# Altium integrated library VIETTIEN_2.IntLib: 110 symbols (part 3 of 5)

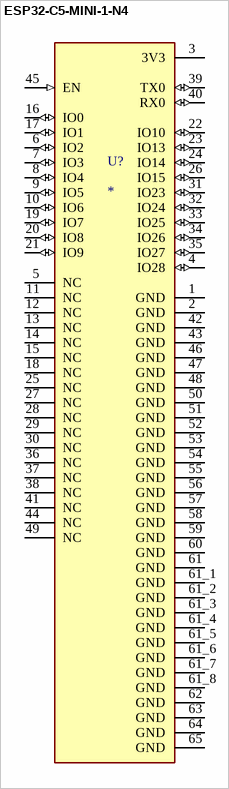
[diagram p46: symbol ESP32-C5-MINI-1-N4]

## ESP32-C5-MINI-1-N4
designator U?
Espressif WiFi module series ESP; MF: Espressif Systems; MP: ESP32-C5-MINI-1-N4; SnapEDA_Link: https://www.snapeda.com/parts/ESP32-C5-MINI-1-N4/Espressif+Systems/view-part/?ref=snap; Package: None; Value: *; Check_prices: https://www.snapeda.com/parts/ESP32-C5-MINI-1-N4/Espressif+Systems/view-part/?ref=eda
footprint XCVR_ESP32-C5-MINI-1-N4
pins: 1 GND (power), 2 GND (power), 3 3V3 (power), 4 IO28 (io), 5 NC, 6 IO2 (io), 7 IO3 (io), 8 IO4 (io), 9 IO5 (io), 10 IO6 (io), 11 NC, 12 NC, 13 NC, 14 NC, 15 NC, 16 IO0 (io), 17 IO1 (io), 18 NC, 19 IO7 (io), 20 IO8 (io), 21 IO9 (io), 22 IO10 (io), 23 IO13 (io), 24 IO14 (io), 25 NC, 26 IO15 (io), 27 NC, 28 NC, 29 NC, 30 NC, 31 IO23 (io), 32 IO24 (io), 33 IO25 (io), 34 IO26 (io), 35 IO27 (io), 36 NC, 37 NC, 38 NC, 39 TX0 (io), 40 RX0 (io), 41 NC, 42 GND (power), 43 GND (power), 44 NC, 45 EN (in), 46 GND (power), 47 GND (power), 48 GND (power), 49 NC, 50 GND (power), 51 GND (power), 52 GND (power), 53 GND (power), 54 GND (power), 55 GND (power), 56 GND (power), 57 GND (power), 58 GND (power), 59 GND (power), 60 GND (power), 61 GND (power), 61_1 GND (power), 61_2 GND (power), 61_3 GND (power), 61_4 GND (power), 61_5 GND (power), 61_6 GND (power), 61_7 GND (power), 61_8 GND (power), 62 GND (power), 63 GND (power), 64 GND (power), 65 GND (power)


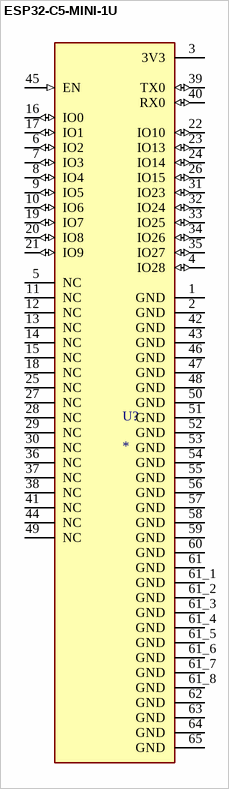
[diagram p47: symbol ESP32-C5-MINI-1U]

## ESP32-C5-MINI-1U
designator U?
Compact Wi-Fi 6 and Bluetooth 5.0 LE wireless module based on the ESP32-C5 SoC, featuring a 32-bit RISC-V single-core processor up to 240 MHz, 4 MB SPI flash, 2.4 GHz and 5 GHz dual-band Wi-Fi, IEEE 802.15.4 (Thread/Zigbee), and an external antenna connector (U.FL/IPEX). Integrated GPIO, SPI, UART, I2C, ADC, PWM and other peripherals. Designed for IoT, wireless communication, smart devices and embedded applications.
footprint ESP32-C5-MINI-1U
pins: 1 GND (power), 2 GND (power), 3 3V3 (power), 4 IO28 (io), 5 NC, 6 IO2 (io), 7 IO3 (io), 8 IO4 (io), 9 IO5 (io), 10 IO6 (io), 11 NC, 12 NC, 13 NC, 14 NC, 15 NC, 16 IO0 (io), 17 IO1 (io), 18 NC, 19 IO7 (io), 20 IO8 (io), 21 IO9 (io), 22 IO10 (io), 23 IO13 (io), 24 IO14 (io), 25 NC, 26 IO15 (io), 27 NC, 28 NC, 29 NC, 30 NC, 31 IO23 (io), 32 IO24 (io), 33 IO25 (io), 34 IO26 (io), 35 IO27 (io), 36 NC, 37 NC, 38 NC, 39 TX0 (io), 40 RX0 (io), 41 NC, 42 GND (power), 43 GND (power), 44 NC, 45 EN (in), 46 GND (power), 47 GND (power), 48 GND (power), 49 NC, 50 GND (power), 51 GND (power), 52 GND (power), 53 GND (power), 54 GND (power), 55 GND (power), 56 GND (power), 57 GND (power), 58 GND (power), 59 GND (power), 60 GND (power), 61 GND (power), 61_1 GND (power), 61_2 GND (power), 61_3 GND (power), 61_4 GND (power), 61_5 GND (power), 61_6 GND (power), 61_7 GND (power), 61_8 GND (power), 62 GND (power), 63 GND (power), 64 GND (power), 65 GND (power)


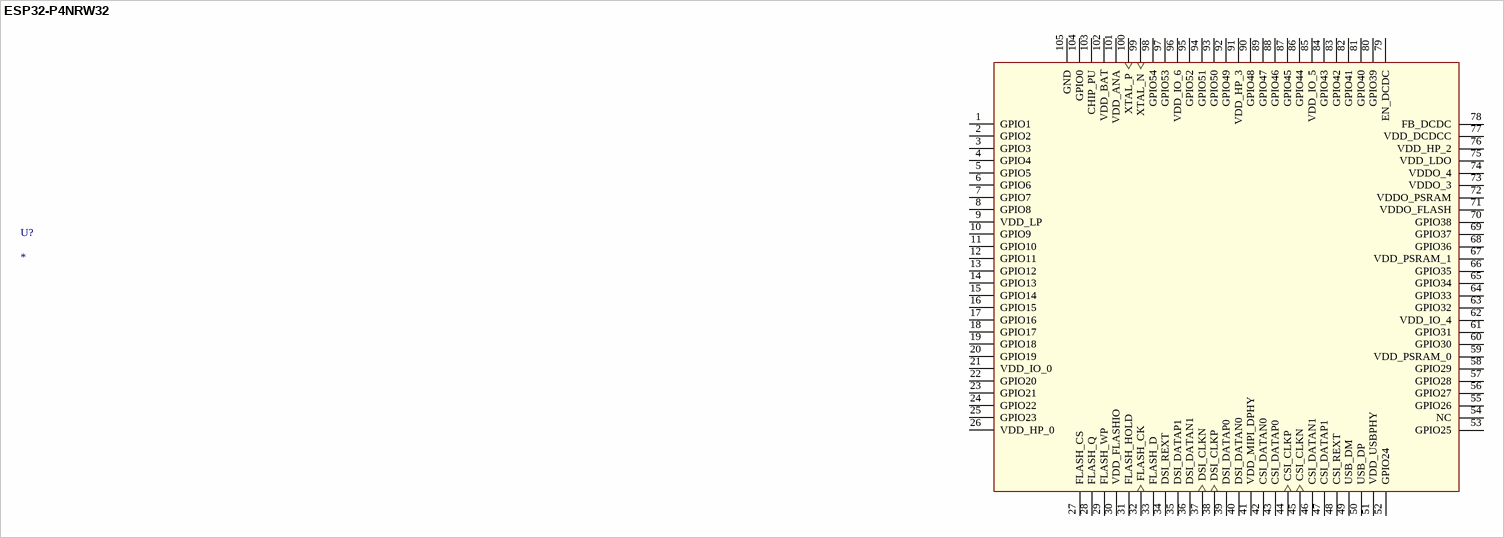
[diagram p48: symbol ESP32-P4NRW32]

## ESP32-P4NRW32
designator U?
High-performance MCU with one RISC-V 32-bit dual-core microprocessor; MF: Espressif Systems; MP: ESP32-P4NRW32; SnapEDA_Link: https://www.snapeda.com/parts/ESP32-P4NRW32/Espressif+Systems/view-part/?ref=snap; Package: None; Value: *; Check_prices: https://www.snapeda.com/parts/ESP32-P4NRW32/Espressif+Systems/view-part/?ref=eda
footprint IC_ESP32-P4NRW32
pins: 1 GPIO1, 2 GPIO2, 3 GPIO3, 4 GPIO4, 5 GPIO5, 6 GPIO6, 7 GPIO7, 8 GPIO8, 9 VDD_LP, 10 GPIO9, 11 GPIO10, 12 GPIO11, 13 GPIO12, 14 GPIO13, 15 GPIO14, 16 GPIO15, 17 GPIO16, 18 GPIO17, 19 GPIO18, 20 GPIO19, 21 VDD_IO_0, 22 GPIO20, 23 GPIO21, 24 GPIO22, 25 GPIO23, 26 VDD_HP_0, 27 FLASH_CS, 28 FLASH_Q, 29 FLASH_WP, 30 VDD_FLASHIO, 31 FLASH_HOLD, 32 FLASH_CK, 33 FLASH_D, 34 DSI_REXT, 35 DSI_DATAP1, 36 DSI_DATAN1, 37 DSI_CLKN, 38 DSI_CLKP, 39 DSI_DATAP0, 40 DSI_DATAN0, 41 VDD_MIPI_DPHY, 42 CSI_DATAN0, 43 CSI_DATAP0, 44 CSI_CLKP, 45 CSI_CLKN, 46 CSI_DATAN1, 47 CSI_DATAP1, 48 CSI_REXT, 49 USB_DM, 50 USB_DP, 51 VDD_USBPHY, 52 GPIO24, 53 GPIO25, 54 NC, 55 GPIO26, 56 GPIO27, 57 GPIO28, 58 GPIO29, 59 VDD_PSRAM_0, 60 GPIO30, 61 GPIO31, 62 VDD_IO_4, 63 GPIO32, 64 GPIO33, 65 GPIO34, 66 GPIO35, 67 VDD_PSRAM_1, 68 GPIO36, 69 GPIO37, 70 GPIO38, 71 VDDO_FLASH, 72 VDDO_PSRAM, 73 VDDO_3, 74 VDDO_4, 75 VDD_LDO, 76 VDD_HP_2, 77 VDD_DCDCC, 78 FB_DCDC, 79 EN_DCDC, 80 GPIO39, 81 GPIO40, 82 GPIO41, 83 GPIO42, 84 GPIO43, 85 VDD_IO_5, 86 GPIO44, 87 GPIO45, 88 GPIO46, 89 GPIO47, 90 GPIO48, 91 VDD_HP_3, 92 GPIO49, 93 GPIO50, 94 GPIO51, 95 GPIO52, 96 VDD_IO_6, 97 GPIO53, 98 GPIO54, 99 XTAL_N, 100 XTAL_P, 101 VDD_ANA, 102 VDD_BAT, 103 CHIP_PU, 104 GPIO0, 105 GND


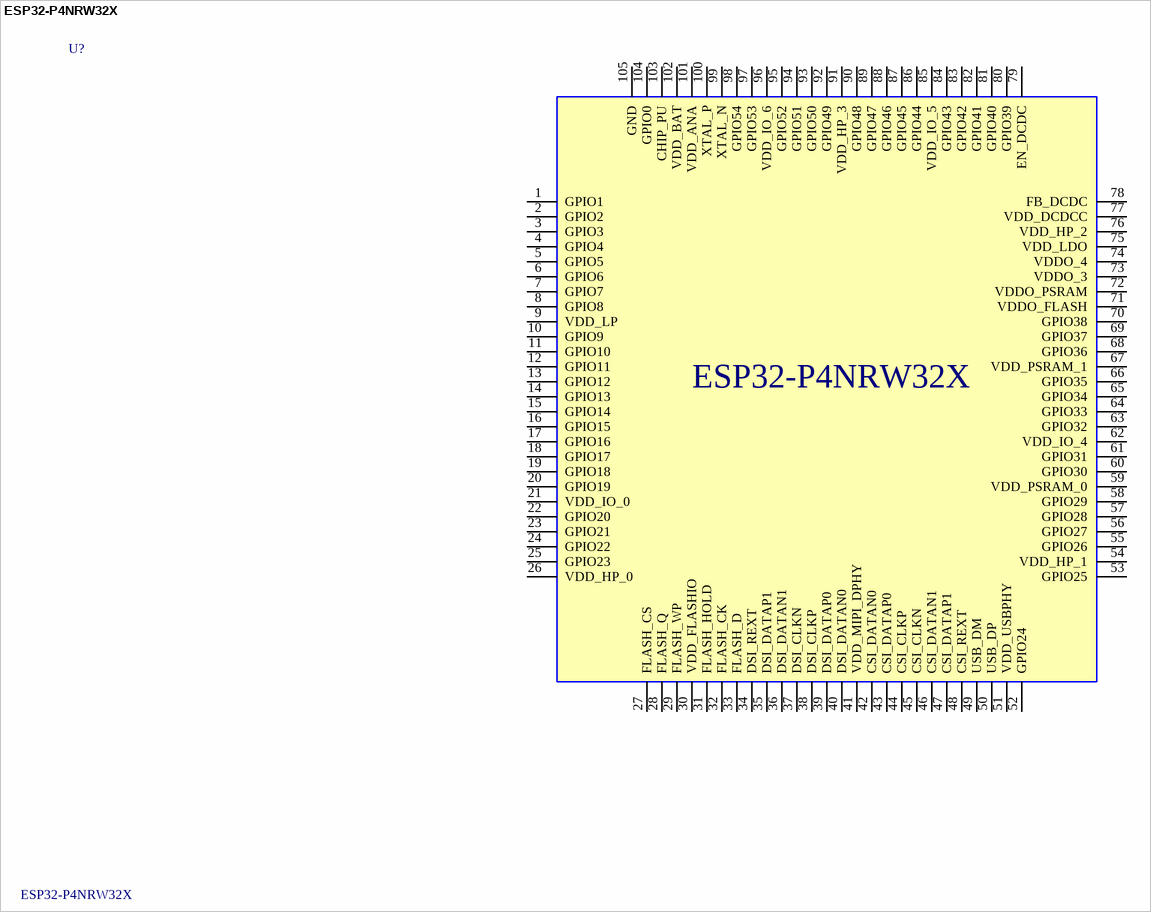
[diagram p49: symbol ESP32-P4NRW32X]

## ESP32-P4NRW32X
designator U?
Manufacturer: Espressif Systems; Value: ESP32-P4NRW32X; MPN: ESP32-P4NRW32X; Mouser Part #: 356-ESP32-P4NRW32X; DigiKey Part #: 1965-ESP32-P4NRW32XTR-ND; Manufacturer Part Number: ESP32-P4NRW32X
footprint ESP32-P4
pins: 1 GPIO1, 2 GPIO2, 3 GPIO3, 4 GPIO4, 5 GPIO5, 6 GPIO6, 7 GPIO7, 8 GPIO8, 9 VDD_LP, 10 GPIO9, 11 GPIO10, 12 GPIO11, 13 GPIO12, 14 GPIO13, 15 GPIO14, 16 GPIO15, 17 GPIO16, 18 GPIO17, 19 GPIO18, 20 GPIO19, 21 VDD_IO_0, 22 GPIO20, 23 GPIO21, 24 GPIO22, 25 GPIO23, 26 VDD_HP_0, 27 FLASH_CS, 28 FLASH_Q, 29 FLASH_WP, 30 VDD_FLASHIO, 31 FLASH_HOLD, 32 FLASH_CK, 33 FLASH_D, 34 DSI_REXT, 35 DSI_DATAP1, 36 DSI_DATAN1, 37 DSI_CLKN, 38 DSI_CLKP, 39 DSI_DATAP0, 40 DSI_DATAN0, 41 VDD_MIPI_DPHY, 42 CSI_DATAN0, 43 CSI_DATAP0, 44 CSI_CLKP, 45 CSI_CLKN, 46 CSI_DATAN1, 47 CSI_DATAP1, 48 CSI_REXT, 49 USB_DM, 50 USB_DP, 51 VDD_USBPHY, 52 GPIO24, 53 GPIO25, 54 VDD_HP_1, 55 GPIO26, 56 GPIO27, 57 GPIO28, 58 GPIO29, 59 VDD_PSRAM_0, 60 GPIO30, 61 GPIO31, 62 VDD_IO_4, 63 GPIO32, 64 GPIO33, 65 GPIO34, 66 GPIO35, 67 VDD_PSRAM_1, 68 GPIO36, 69 GPIO37, 70 GPIO38, 71 VDDO_FLASH, 72 VDDO_PSRAM, 73 VDDO_3, 74 VDDO_4, 75 VDD_LDO, 76 VDD_HP_2, 77 VDD_DCDCC, 78 FB_DCDC, 79 EN_DCDC, 80 GPIO39, 81 GPIO40, 82 GPIO41, 83 GPIO42, 84 GPIO43, 85 VDD_IO_5, 86 GPIO44, 87 GPIO45, 88 GPIO46, 89 GPIO47, 90 GPIO48, 91 VDD_HP_3, 92 GPIO49, 93 GPIO50, 94 GPIO51, 95 GPIO52, 96 VDD_IO_6, 97 GPIO53, 98 GPIO54, 99 XTAL_N, 100 XTAL_P, 101 VDD_ANA, 102 VDD_BAT, 103 CHIP_PU, 104 GPIO0, 105 GND


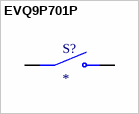
[diagram p50: symbol EVQ9P701P]

## EVQ9P701P
designator S?
MF: {'manufacturer': u'Panasonic Electronic Components'}; MP: EVQ9P701P; Package: None; Price: None; Value: *; Availability: Unavailable
footprint SW_EVQ9P701P
pins: 1_A NO, 1_B NO, 2_A NC, 2_B NC


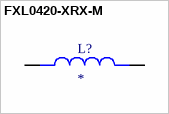
[diagram p51: symbol FXL0420-XRX-M]

## FXL0420-XRX-M
designator L?
footprint FXL0420-XRX-M
pins: 1, 2


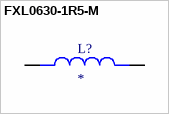
[diagram p52: symbol FXL0630-1R5-M]

## FXL0630-1R5-M
designator L?
MF: Analog Devices; MP: FXL0630-1R5-M; SnapEDA_Link: https://www.snapeda.com/parts/FXL0630-1R5-M/Analog+Devices/view-part/?ref=snap; Package: None; Value: *; Check_prices: https://www.snapeda.com/parts/FXL0630-1R5-M/Analog+Devices/view-part/?ref=eda
footprint INDM7066X300N
pins: 1, 2


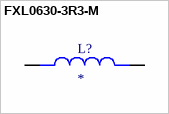
[diagram p53: symbol FXL0630-3R3-M]

## FXL0630-3R3-M
designator L?
Wire Wound Molded SMD Type Power Inductor; MF: Cjiang TW; MP: FXL0630-3R3-M; SnapEDA_Link: https://www.snapeda.com/parts/FXL0630-3R3-M/Cjiang+TW/view-part/?ref=snap; Package: Package; Value: *; Check_prices: https://www.snapeda.com/parts/FXL0630-3R3-M/Cjiang+TW/view-part/?ref=eda
footprint INDM7066X300N
pins: 1, 2


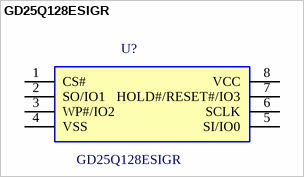
[diagram p54: symbol GD25Q128ESIGR]

## GD25Q128ESIGR
designator U?
Manufacturer: GigaDevice Semicon Beijing; Value: GD25Q128ESIGR; MPN: GD25Q128ESIGR; LCSC Part #: C2928891; Manufacturer Part Number: GD25Q128ESIGR
footprint SOIC-8_3.9x4.9mm_P1.27mm
pins: 1 CS#, 2 SO/IO1, 3 WP#/IO2, 4 VSS (power), 5 SI/IO0, 6 SCLK, 7 HOLD#/RESET#/IO3, 8 VCC (power)


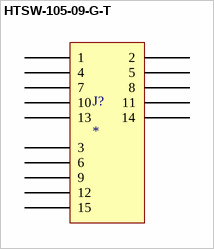
[diagram p55: symbol HTSW-105-09-G-T]

## HTSW-105-09-G-T
designator J?
15-Pin (3x5) Triple-Row Vertical Male Pin Header, 2.54mm Pitch, THT, Gold-Plated Contacts
footprint HTSW-105-09-G-T
pins: 1, 2, 3, 4, 5, 6, 7, 8, 9, 10, 11, 12, 13, 14, 15


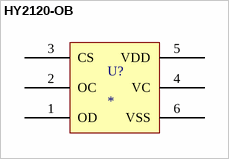
[diagram p56: symbol HY2120-OB]

## HY2120-OB
designator U?
2-cell Li-ion/Li-polymer battery protection IC with overcharge, over-discharge, overcurrent, and short-circuit protection.
footprint SOT23-6
pins: 1 OD, 2 OC, 3 CS, 4 VC, 5 VDD, 6 VSS


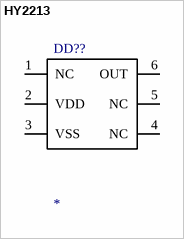
[diagram p57: symbol HY2213]

## HY2213
designator DD??
1 Cell Li-ion/Polymer Battery Charge Balance IC
footprint SOT23-6
pins: 1 NC (hiz), 2 VDD (power), 3 VSS (power), 4 NC (hiz), 5 NC (hiz), 6 OUT


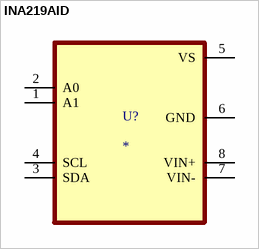
[diagram p58: symbol INA219AID]

## INA219AID
designator U?
26-V 12-bit I2C output digital power monitor; MF: Texas Instruments; MP: INA219AID; SnapEDA_Link: https://www.snapeda.com/parts/INA219AID/Texas+Instruments/view-part/?ref=snap; Package: SOIC-8 Texas Instruments; Value: *; Check_prices: https://www.snapeda.com/parts/INA219AID/Texas+Instruments/view-part/?ref=eda
footprint SOIC127P599X175-8N
pins: 1 A1, 2 A0, 3 SDA, 4 SCL, 5 VS (power), 6 GND (power), 7 VIN-, 8 VIN+


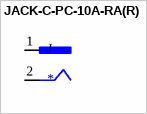
[diagram p59: symbol JACK-C-PC-10A-RA(R)]

## JACK-C-PC-10A-RA(R)
designator J
Power Barrel Connector Jack 2.10mm ID _0.083_, 5.50mm OD _0.217_ Through Hole, Right Angle; MF: GlobTek, Inc.; MP: JACK-C-PC-10A-RA_R_; Value: *; Digi-Key_Purchase_URL: https://www.digikey.com/product-detail/en/globtek-inc/JACK-C-PC-10A-RA_R_/1939-1086-ND/8597889?utm_source=snapeda&utm_medium=aggregator&utm_campaign=symbol; Digi-Key_Part_Number: 1939-1086-ND; Package: None; SnapEDA_Link: https://www.snapeda.com/parts/JACK-C-PC-10A-RA%28R%29/GlobTek%2C%20Inc./view-part/3076017/?ref=snap
footprint GLOBTECK_JACK-C-PC-10A-RA(R)
pins: 1, 2


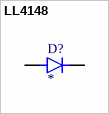
[diagram p60: symbol LL4148]

## LL4148
designator D?
Small Signal Diode, SOD-80, 100V, 0.15A, 175Â°C; MF: Diotec Semiconductor; MP: LL4148; SnapEDA_Link: https://www.snapeda.com/parts/LL4148/Diotec/view-part/?ref=snap; Package: SOD-80 Diotec; Value: *; Check_prices: https://www.snapeda.com/parts/LL4148/Diotec/view-part/?ref=eda
footprint DIO_LL4148
pins: A, C


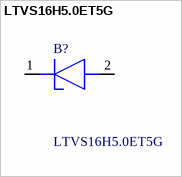
[diagram p61: symbol LTVS16H5.0ET5G]

## LTVS16H5.0ET5G
designator B?
DFN1610 ESD Protection Devices ROHS; Manufacturer_Name: LRC; Geometry.Height: 0.55mm; Manufacturer_Part_Number: LTVS16H5.0ET5G; Mouser Part Number: *; Mouser Price/Stock: *; Arrow Part Number: *; Arrow Price/Stock: *; Datasheet Link: https://www.alldatasheet.net/datasheet-pdf/pdf/1107931/LRC/LTVS16H5.0ET5G.html
footprint LTVS16H50ET5G
pins: 1 K, 2 A


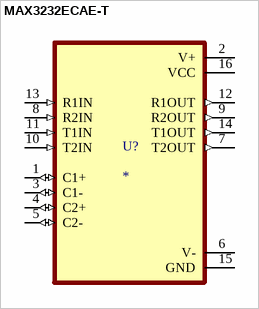
[diagram p62: symbol MAX3232ECAE-T]

## MAX3232ECAE-T
designator U?
Â±15kV ESD-Protected, Down to 10nA, 3.0V to 5.5V, Up to 1Mbps, True RS-232 Transceivers; MF: Analog Devices; MP: MAX3232ECAE+T; SnapEDA_Link: https://www.snapeda.com/parts/MAX3232ECAE+T/Analog+Devices/view-part/?ref=snap; Package: SSOP-16 Maxim; Value: *; Check_prices: https://www.snapeda.com/parts/MAX3232ECAE+T/Analog+Devices/view-part/?ref=eda
footprint SOP65P777X199-16N
pins: 1 C1+ (io), 2 V+ (power), 3 C1- (io), 4 C2+ (io), 5 C2- (io), 6 V- (power), 7 T2OUT (out), 8 R2IN (in), 9 R2OUT (out), 10 T2IN (in), 11 T1IN (in), 12 R1OUT (out), 13 R1IN (in), 14 T1OUT (out), 15 GND (power), 16 VCC (power)


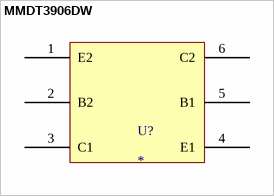
[diagram p63: symbol MMDT3906DW]

## MMDT3906DW
designator U?
Bipolar (BJT) Transistor PNP 40 V 0.2 A 250MHz 200 mW Surface Mount SOT-363
footprint SOT65P230X120-6N
pins: 1 E2, 2 B2, 3 C1, 4 E1, 5 B1, 6 C2


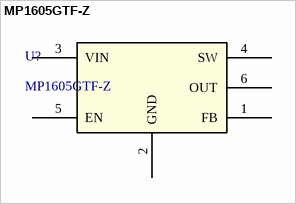
[diagram p64: symbol MP1605GTF-Z]

## MP1605GTF-Z
designator U?
2A 5.5V 2.2MHz Synchronous Step-Down Converter with Low11&micro;A Quiescent Current in SOT563 Package; Manufacturer_Name: Monolithic Power Systems; Copyright: Copyright (C) 2025 Ultra Librarian. All rights reserved.; Manufacturer_Part_Number: MP1605GTF-Z; RefDes: RefDes; Type: Type
footprint SOT563_MP1605_MNP
pins: 1 FB, 2 GND (power), 3 VIN (power), 4 SW, 5 EN, 6 OUT (power)


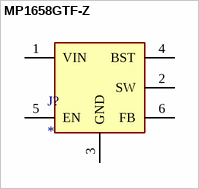
[diagram p65: symbol MP1658GTF-Z]

## MP1658GTF-Z
designator J?
MF: MPS Industries, Inc.; MP: MP1658GTF-Z; SnapEDA_Link: https://www.snapeda.com/parts/MP1658GTF-Z/MPS/view-part/?ref=snap; Package: None; Value: *; Check_prices: https://www.snapeda.com/parts/MP1658GTF-Z/MPS/view-part/?ref=eda
footprint SOTFL50P160X60-6N
pins: 1 VIN, 2 SW, 3 GND, 4 BST, 5 EN, 6 FB


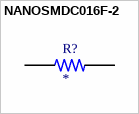
[diagram p66: symbol NANOSMDC016F-2]

## NANOSMDC016F-2
designator R?
PTC RESETTABLE FUSE, 48VDC, 1206; Thermistor Mounting:SMD; Product Range:PolySwitch nanoSMDC Series; Holding Current:160mA; Tripping Current:450mA; Voltage Rating:48VDC; Operating Temperature Min:-40Â°C; Operating Tempera; MF: Littelfuse, Inc.; MP: NANOSMDC016F-2; SnapEDA_Link: https://www.snapeda.com/parts/NANOSMDC016F-2/Littelfuse/view-part/?ref=snap; Package: 1206 Littelfuse; Value: *; Check_prices: https://www.snapeda.com/parts/NANOSMDC016F-2/Littelfuse/view-part/?ref=eda
footprint RESC3115X65N
pins: 1, 2


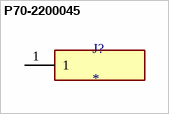
[diagram p67: symbol P70-2200045]

## P70-2200045
designator J?
MP: P70-2200045; Package: None; Price: None; Value: *; Availability: Unavailable
footprint HARWIN_P70-2200045
pins: 1


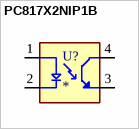
[diagram p68: symbol PC817X2NIP1B]

## PC817X2NIP1B
designator U?
Optocoupler DC-IN 1-CH Transistor DC-OUT 4-Pin DIP SMD T/R; MF: Sharp Microelectronics; MP: PC817X2NIP1B; SnapEDA_Link: https://www.snapeda.com/parts/PC817X2NIP1B/Sharp+Microelectronics/view-part/?ref=snap; Package: SMD-4 Sharp Microelectronics; Value: *; Check_prices: https://www.snapeda.com/parts/PC817X2NIP1B/Sharp+Microelectronics/view-part/?ref=eda
footprint SOIC254P960X420-4N
pins: 1 A, 2 C, 3 ET, 4 CT
